# Altium schematic symbol library BZT52C12-7-F.SchLib: 1 symbol
Pins are listed as number, name and electrical type; pins without a type are passive.

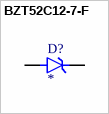
[diagram p0: symbol BZT52C12-7-F]

## BZT52C12-7-F
designator D?
Zener Diode 12V 5.3% 500mW SOD123 | Diodes Inc BZT52C12-7-F; MF: Diodes Inc.; SnapEDA_Link: https://www.snapeda.com/parts/BZT52C12-7-F/Diodes+Inc./view-part/?ref=snap; Package: SOD-123 Fairchild Semiconductor; Value: *; MP: BZT52C12-7-F; Check_prices: https://www.snapeda.com/parts/BZT52C12-7-F/Diodes+Inc./view-part/?ref=eda
footprint DIO_BZT52C12-7-F
pins: 1 K, 2 A